# Altium footprint library SRD-12VDC-SL-C.PcbLib: 1 footprints
Each footprint in its own frame and in the unit in brackets; x right, y up, seen from the top. Pads: shape width x height; smd on the part's side, far side on the other; paste and mask are expansions set on the pad; w line width, h text height; cw(c..) or ccw(c..) is an arc to the next point about the centre after c.
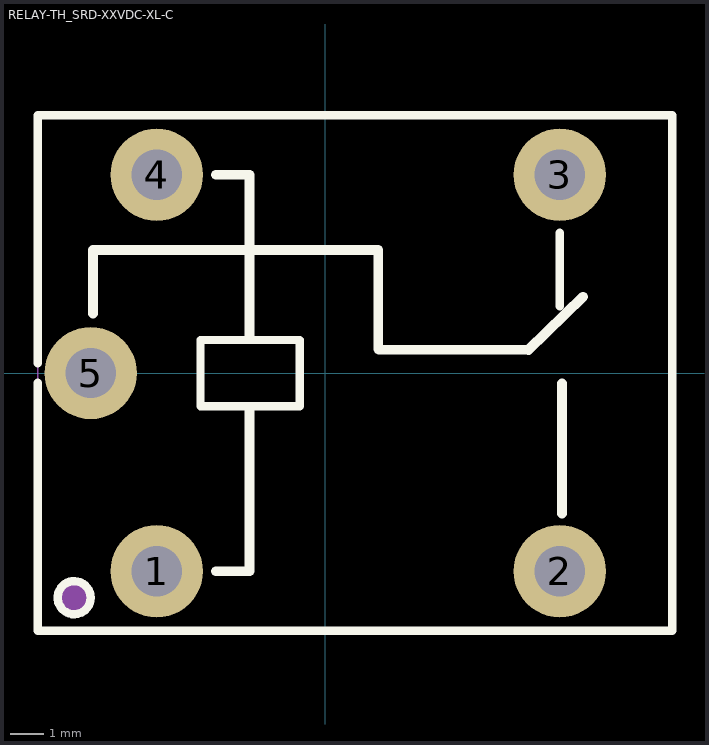
[diagram p0: the footprint, top view; thin cyan lines are the x and y axes]

## RELAY-TH_SRD-XXVDC-XL-C [mil]
pads (5):
  round 110 hole 60: 1(-200.79,-236.22) 2(279.52,-236.2) 3(279.53,236.2) 4(-200.79,236.22) 5(-279.53,0)
Top Overlay:
  circle w10: c-299.21,-267.72 r19.69
  lines w10: -342.49,-11.6 -342.49,-307.09 413.43,-307.09 ; -342.49,11.6 -342.49,307.09 413.42,307.09 413.43,-307.09 ; 279.5,79.5 279.5,167.2 ; -148.62,-39.37 -148.62,39.37 -30.51,39.37 -30.51,-39.37 -148.62,-39.37
  lines w11.81: -276.84,70.87 -276.84,146.74 63.16,146.74 63.16,28.63 64.11,27.68 222.22,27.68 242.22,27.68 ; -130.31,-236.22 -90.24,-236.22 -90.24,-41.39 ; -130.31,236.22 -90.24,236.22 -90.24,41.37 ; 242.13,27.6 307.11,90.9 ; 282.22,-167.6 282.22,-12.3
Mechanical 2:
  circle w19.68: c-299.21,-267.72 r9.84
Mechanical 6:
  lines w2: -342.52,-307.07 413.39,-307.07 413.39,307.09 -342.52,307.09 -342.52,-307.07
Mechanical 8:
  region: -340.16,-307.07 -340.16,-308.05 -341.54,-309.43 -343.5,-309.43 -344.88,-308.05 -344.88,-307.07 -344.88,-306.09 -343.5,-304.71 -341.54,-304.71 -340.16,-306.09 -340.16,-307.07
Mechanical 9:
  region: -188.97,-236.22 -188.97,-238.57 -190.77,-242.91 -194.1,-246.24 -198.44,-248.04 -203.14,-248.04 -207.48,-246.24 -210.81,-242.91 -212.61,-238.57 -212.61,-236.22 -212.61,-233.87 -210.81,-229.53 -207.48,-226.2 -203.14,-224.4 -198.44,-224.4 -194.1,-226.2 -190.77,-229.53 -188.97,-233.87 -188.97,-236.22
  region: -188.97,236.22 -188.97,233.87 -190.77,229.53 -194.1,226.2 -198.44,224.4 -203.14,224.4 -207.48,226.2 -210.81,229.53 -212.61,233.87 -212.61,236.22 -212.61,238.57 -210.81,242.91 -207.48,246.24 -203.14,248.04 -198.44,248.04 -194.1,246.24 -190.77,242.91 -188.97,238.57 -188.97,236.22
  region: 299.21,-246.04 259.85,-246.04 259.85,-226.36 299.21,-226.36
  region: 299.21,226.36 259.85,226.36 259.85,246.04 299.21,246.04
  region: -271.66,21.65 -271.66,-21.65 -287.4,-21.65 -287.4,21.65